# Altium schematic symbol library ERJ-2GE0R00X.SchLib: 1 symbol
Pins are listed as number, name and electrical type; pins without a type are passive.

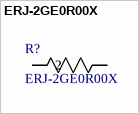
[diagram p0: symbol ERJ-2GE0R00X]

## ERJ-2GE0R00X
designator R?
RESISTOR; 0402; 0 OHM; 0%; JUMPER; 0.10W; THICK FILM; Manufacturer_Name: Panasonic; Copyright: Copyright (C) 2025 Ultra Librarian. All rights reserved.; Manufacturer_Part_Number: ERJ-2GE0R00X
footprint RC0402N_PAN
pins: 1, 2